# Altium footprint library 排母.PcbLib: 66 footprints (part 4 of 5)
Each footprint in its own frame and in the unit in brackets; x right, y up, seen from the top. Pads: shape width x height; smd on the part's side, far side on the other; paste and mask are expansions set on the pad; w line width, h text height; cw(c..) or ccw(c..) is an arc to the next point about the centre after c.
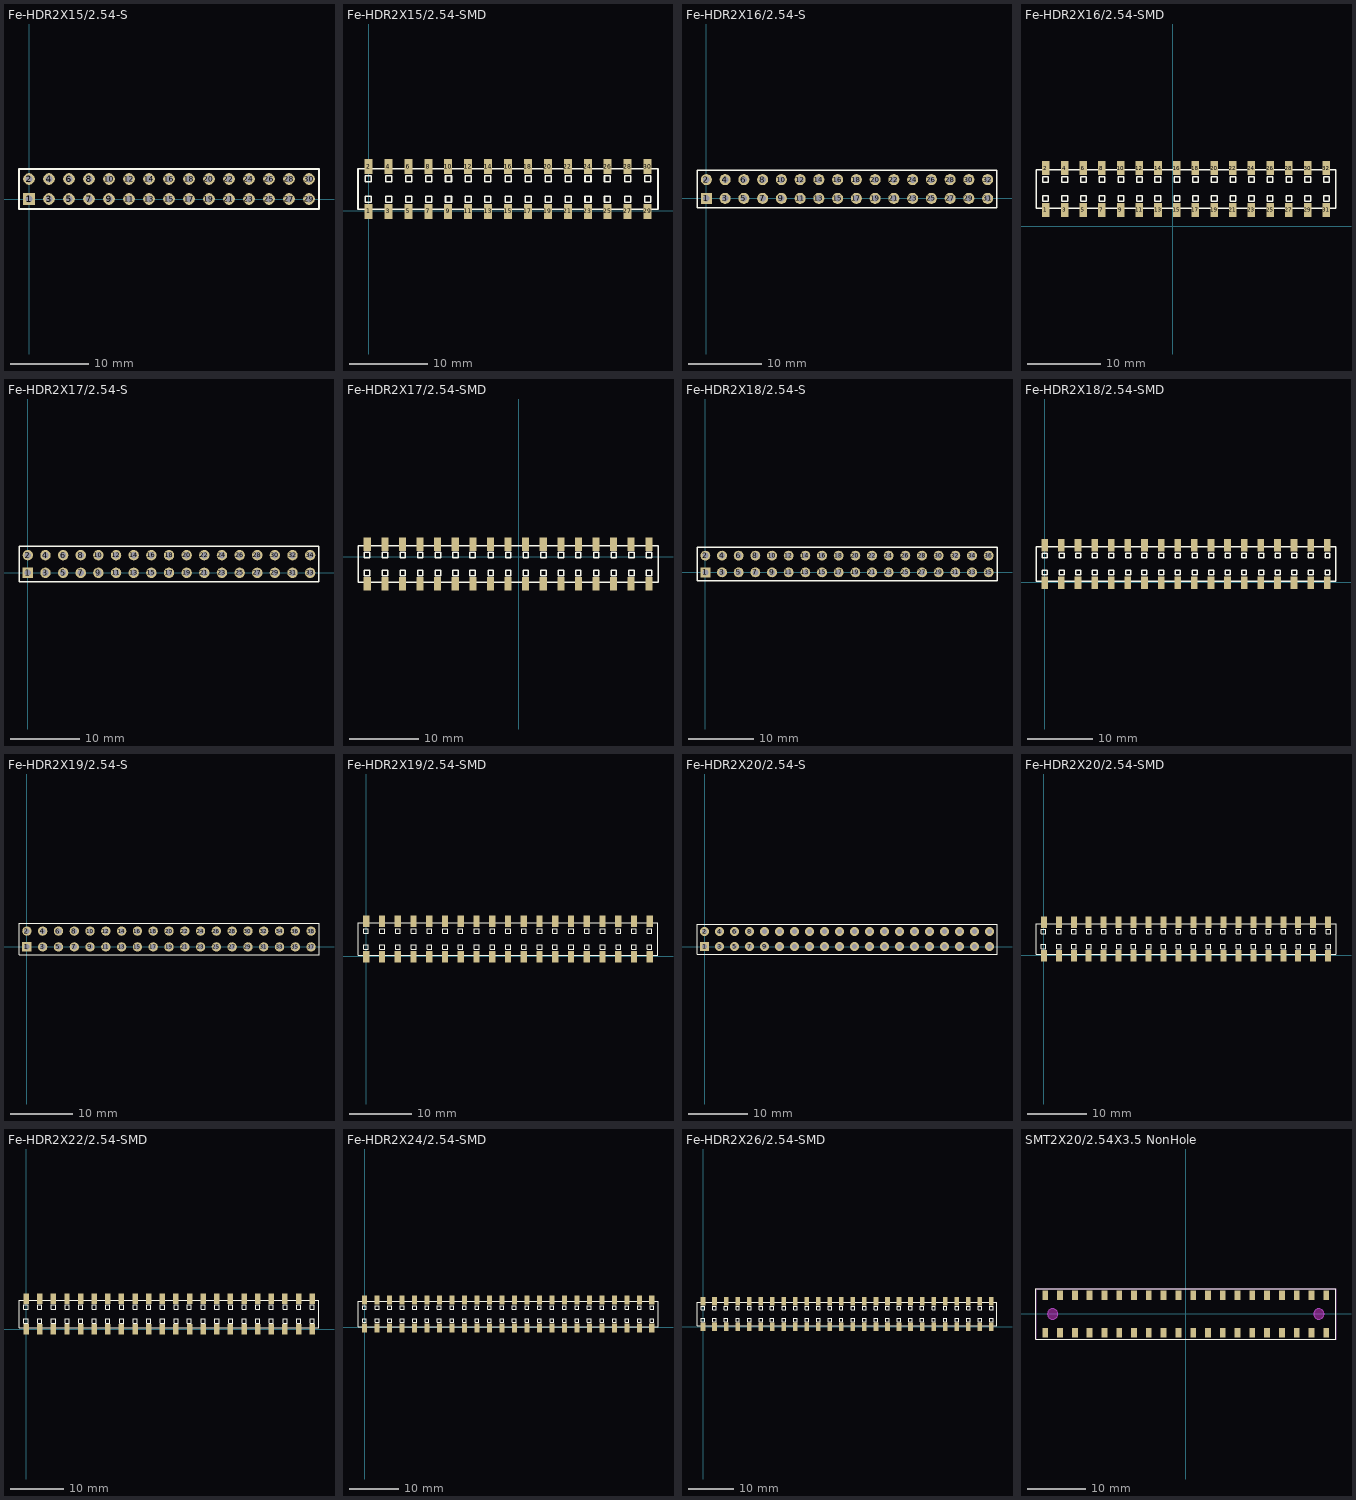
[diagram p3: the footprints below, top view; thin cyan lines are the x and y axes]

## Fe-HDR2X15/2.54-S [mm] "Connector; Header; 15x2 Position"
pads (30):
  rect 1.5x1.5 hole 0.9: 1(0,0)
  round 1.5 hole 0.9: 2(0,2.54) 3(2.54,0) 4(2.54,2.54) 5(5.08,0) 6(5.08,2.54) 7(7.62,0) 8(7.62,2.54) 9(10.16,0) 10(10.16,2.54) 11(12.7,0) 12(12.7,2.54) 13(15.24,0) 14(15.24,2.54) 15(17.78,0) 16(17.78,2.54) 17(20.32,0) 18(20.32,2.54) 19(22.86,0) 20(22.86,2.54) 21(25.4,0) 22(25.4,2.54) 23(27.94,0) 24(27.94,2.54) 25(30.48,0) 26(30.48,2.54) 27(33.02,0) 28(33.02,2.54) 29(35.56,0) 30(35.56,2.54)
Top Overlay:
  lines w0.2: -1.27,-1.27 -1.27,3.81 36.83,3.81 36.83,-1.27 -1.27,-1.27
3D body "Female-Header-2.54-Double-30.stp": height 8.5, standoff -3.2, extent -1.397,-1.27 36.953,3.73

## Fe-HDR2X15/2.54-SMD [mm]
pads (30):
  rect 1.02x1.9 smd: 1(0,-0.056) 2(0,5.644) 3(2.54,-0.056) 4(2.54,5.644) 5(5.08,-0.056) 6(5.08,5.644) 7(7.62,-0.056) 8(7.62,5.644) 9(10.16,-0.056) 10(10.16,5.644) 11(12.7,-0.056) 12(12.7,5.644) 13(15.24,-0.056) 14(15.24,5.644) 15(17.78,-0.056) 16(17.78,5.644) 17(20.32,-0.056) 18(20.32,5.644) 19(22.86,-0.056) 20(22.86,5.644) 21(25.4,-0.056) 22(25.4,5.644) 23(27.94,-0.056) 24(27.94,5.644) 25(30.48,-0.056) 26(30.48,5.644) 27(33.02,-0.056) 28(33.02,5.644) 29(35.56,-0.056) 30(35.56,5.644)
Top Overlay:
  lines w0.2: -1.34,0.194 36.89,0.194 36.89,5.394 -1.34,5.394 -1.34,0.194 ; -0.411,1.113 -0.411,1.875 0.351,1.875 0.351,1.113 -0.411,1.113 ; -0.411,3.713 -0.411,4.475 0.351,4.475 0.351,3.713 -0.411,3.713 ; 2.189,1.113 2.189,1.875 2.951,1.875 2.951,1.113 2.189,1.113 ; 2.189,3.713 2.189,4.475 2.951,4.475 2.951,3.713 2.189,3.713 ; 4.729,1.113 5.491,1.113 5.491,1.875 4.729,1.875 4.729,1.113 ; 4.729,3.713 5.491,3.713 5.491,4.475 4.729,4.475 4.729,3.713 ; 7.269,1.113 7.269,1.875 8.031,1.875 8.031,1.113 7.269,1.113 ; 7.269,3.713 7.269,4.475 8.031,4.475 8.031,3.713 7.269,3.713 ; 9.809,1.113 9.809,1.875 10.571,1.875 10.571,1.113 9.809,1.113 ; 9.809,3.713 9.809,4.475 10.571,4.475 10.571,3.713 9.809,3.713 ; 12.349,1.113 12.349,1.875 13.111,1.875 13.111,1.113 12.349,1.113 ; 12.349,3.713 12.349,4.475 13.111,4.475 13.111,3.713 12.349,3.713 ; 14.829,1.113 15.591,1.113 15.591,1.875 14.829,1.875 14.829,1.113 ; 14.829,3.713 15.591,3.713 15.591,4.475 14.829,4.475 14.829,3.713 ; 17.429,1.113 18.191,1.113 18.191,1.875 17.429,1.875 17.429,1.113 ; 17.429,3.713 18.191,3.713 18.191,4.475 17.429,4.475 17.429,3.713 ; 19.969,1.113 19.969,1.875 20.731,1.875 20.731,1.113 19.969,1.113 ; 19.969,3.713 19.969,4.475 20.731,4.475 20.731,3.713 19.969,3.713 ; 22.509,1.113 23.271,1.113 23.271,1.875 22.509,1.875 22.509,1.113 ; 22.509,3.713 23.271,3.713 23.271,4.475 22.509,4.475 22.509,3.713 ; 25.049,1.113 25.811,1.113 25.811,1.875 25.049,1.875 25.049,1.113 ; 25.049,3.713 25.811,3.713 25.811,4.475 25.049,4.475 25.049,3.713 ; 27.589,1.113 28.351,1.113 28.351,1.875 27.589,1.875 27.589,1.113 ; 27.589,3.713 28.351,3.713 28.351,4.475 27.589,4.475 27.589,3.713 ; 30.069,1.113 30.831,1.113 30.831,1.875 30.069,1.875 30.069,1.113 ; 30.069,3.713 30.831,3.713 30.831,4.475 30.069,4.475 30.069,3.713 ; 32.669,1.113 33.431,1.113 33.431,1.875 32.669,1.875 32.669,1.113 ; 32.669,3.713 33.431,3.713 33.431,4.475 32.669,4.475 32.669,3.713 ; 35.209,1.113 35.209,1.875 35.971,1.875 35.971,1.113 35.209,1.113 ; 35.209,3.713 35.209,4.475 35.971,4.475 35.971,3.713 35.209,3.713
3D body "Fe-Header2X1.STEP": height 5.15, standoff 0, extent 34.23,-0.558 36.83,5.842
3D body "Fe-Header2X1.STEP": height 5.15, standoff 0, extent 13.91,-0.558 16.51,5.842
3D body "Fe-Header2X1.STEP": height 5.15, standoff 0, extent 11.37,-0.558 13.97,5.842
3D body "Fe-Header2X1.STEP": height 5.15, standoff 0, extent 6.29,-0.558 8.89,5.842
3D body "Fe-Header2X1.STEP": height 5.15, standoff 0, extent 8.83,-0.558 11.43,5.842
3D body "Fe-Header2X1.STEP": height 5.15, standoff 0, extent -1.33,-0.558 1.27,5.842
3D body "Fe-Header2X1.STEP": height 5.15, standoff 0, extent 1.21,-0.558 3.81,5.842
3D body "Fe-Header2X1.STEP": height 5.15, standoff 0, extent 3.75,-0.558 6.35,5.842
3D body "Fe-Header2X1.STEP": height 5.15, standoff 0, extent 21.53,-0.558 24.13,5.842
3D body "Fe-Header2X1.STEP": height 5.15, standoff 0, extent 18.99,-0.558 21.59,5.842
3D body "Fe-Header2X1.STEP": height 5.15, standoff 0, extent 16.45,-0.558 19.05,5.842
3D body "Fe-Header2X1.STEP": height 5.15, standoff 0, extent 26.61,-0.558 29.21,5.842
3D body "Fe-Header2X1.STEP": height 5.15, standoff 0, extent 24.07,-0.558 26.67,5.842
3D body "Fe-Header2X1.STEP": height 5.15, standoff 0, extent 29.15,-0.558 31.75,5.842
3D body "Fe-Header2X1.STEP": height 5.15, standoff 0, extent 31.69,-0.558 34.29,5.842

## Fe-HDR2X16/2.54-S [mm] "Connector; Header; 16x2 Position"
pads (32):
  rect 1.5x1.5 hole 0.9: 1(0,0)
  round 1.5 hole 0.9: 2(0,2.54) 3(2.54,0) 4(2.54,2.54) 5(5.08,0) 6(5.08,2.54) 7(7.62,0) 8(7.62,2.54) 9(10.16,0) 10(10.16,2.54) 11(12.7,0) 12(12.7,2.54) 13(15.24,0) 14(15.24,2.54) 15(17.78,0) 16(17.78,2.54) 17(20.32,0) 18(20.32,2.54) 19(22.86,0) 20(22.86,2.54) 21(25.4,0) 22(25.4,2.54) 23(27.94,0) 24(27.94,2.54) 25(30.48,0) 26(30.48,2.54) 27(33.02,0) 28(33.02,2.54) 29(35.56,0) 30(35.56,2.54) 31(38.1,0) 32(38.1,2.54)
Top Overlay:
  lines w0.2: -1.27,-1.27 39.37,-1.27 39.37,3.81 -1.27,3.81 -1.27,-1.27
3D body "Female-Header-2.54-Double-32.stp": height 8.5, standoff -3.2, extent -1.397,-1.19 39.493,3.81

## Fe-HDR2X16/2.54-SMD [mm]
pads (32):
  rect 1.02x1.9 smd: 1(-17.272,2.23) 2(-17.272,7.93) 3(-14.732,2.23) 4(-14.732,7.93) 5(-12.192,2.23) 6(-12.192,7.93) 7(-9.652,2.23) 8(-9.652,7.93) 9(-7.112,2.23) 10(-7.112,7.93) 11(-4.572,2.23) 12(-4.572,7.93) 13(-2.032,2.23) 14(-2.032,7.93) 15(0.508,2.23) 16(0.508,7.93) 17(3.048,2.23) 18(3.048,7.93) 19(5.588,2.23) 20(5.588,7.93) 21(8.128,2.23) 22(8.128,7.93) 23(10.668,2.23) 24(10.668,7.93) 25(13.208,2.23) 26(13.208,7.93) 27(15.748,2.23) 28(15.748,7.93) 29(18.288,2.23) 30(18.288,7.93) 31(20.828,2.23) 32(20.828,7.93)
Top Overlay:
  lines w0.2: -18.612,2.48 -18.612,7.68 22.158,7.68 22.158,2.48 -18.612,2.48 ; -17.683,3.399 -16.921,3.399 -16.921,4.161 -17.683,4.161 -17.683,3.399 ; -17.683,5.999 -16.921,5.999 -16.921,6.761 -17.683,6.761 -17.683,5.999 ; -15.083,3.399 -14.321,3.399 -14.321,4.161 -15.083,4.161 -15.083,3.399 ; -15.083,5.999 -14.321,5.999 -14.321,6.761 -15.083,6.761 -15.083,5.999 ; -12.543,3.399 -12.543,4.161 -11.781,4.161 -11.781,3.399 -12.543,3.399 ; -12.543,5.999 -12.543,6.761 -11.781,6.761 -11.781,5.999 -12.543,5.999 ; -10.003,3.399 -9.241,3.399 -9.241,4.161 -10.003,4.161 -10.003,3.399 ; -10.003,5.999 -9.241,5.999 -9.241,6.761 -10.003,6.761 -10.003,5.999 ; -7.463,3.399 -6.701,3.399 -6.701,4.161 -7.463,4.161 -7.463,3.399 ; -7.463,5.999 -6.701,5.999 -6.701,6.761 -7.463,6.761 -7.463,5.999 ; -4.923,3.399 -4.161,3.399 -4.161,4.161 -4.923,4.161 -4.923,3.399 ; -4.923,5.999 -4.161,5.999 -4.161,6.761 -4.923,6.761 -4.923,5.999 ; -2.443,3.399 -2.443,4.161 -1.681,4.161 -1.681,3.399 -2.443,3.399 ; -2.443,5.999 -2.443,6.761 -1.681,6.761 -1.681,5.999 -2.443,5.999 ; 0.157,3.399 0.157,4.161 0.919,4.161 0.919,3.399 0.157,3.399 ; 0.157,5.999 0.157,6.761 0.919,6.761 0.919,5.999 0.157,5.999 ; 2.697,3.399 3.459,3.399 3.459,4.161 2.697,4.161 2.697,3.399 ; 2.697,5.999 3.459,5.999 3.459,6.761 2.697,6.761 2.697,5.999 ; 5.237,3.399 5.237,4.161 5.999,4.161 5.999,3.399 5.237,3.399 ; 5.237,5.999 5.237,6.761 5.999,6.761 5.999,5.999 5.237,5.999 ; 7.777,3.399 7.777,4.161 8.539,4.161 8.539,3.399 7.777,3.399 ; 7.777,5.999 7.777,6.761 8.539,6.761 8.539,5.999 7.777,5.999 ; 10.317,3.399 10.317,4.161 11.079,4.161 11.079,3.399 10.317,3.399 ; 10.317,5.999 10.317,6.761 11.079,6.761 11.079,5.999 10.317,5.999 ; 12.797,3.399 12.797,4.161 13.559,4.161 13.559,3.399 12.797,3.399 ; 12.797,5.999 12.797,6.761 13.559,6.761 13.559,5.999 12.797,5.999 ; 15.397,3.399 15.397,4.161 16.159,4.161 16.159,3.399 15.397,3.399 ; 15.397,5.999 15.397,6.761 16.159,6.761 16.159,5.999 15.397,5.999 ; 17.937,3.399 18.699,3.399 18.699,4.161 17.937,4.161 17.937,3.399 ; 17.937,5.999 18.699,5.999 18.699,6.761 17.937,6.761 17.937,5.999 ; 20.477,3.399 20.477,4.161 21.239,4.161 21.239,3.399 20.477,3.399 ; 20.477,5.999 20.477,6.761 21.239,6.761 21.239,5.999 20.477,5.999
3D body "Fe-Header2X1.STEP": height 5.15, standoff 0, extent -5.842,1.778 -3.242,8.178
3D body "Fe-Header2X1.STEP": height 5.15, standoff 0, extent -10.922,1.778 -8.322,8.178
3D body "Fe-Header2X1.STEP": height 5.15, standoff 0, extent -8.382,1.778 -5.782,8.178
3D body "Fe-Header2X1.STEP": height 5.15, standoff 0, extent -18.542,1.778 -15.942,8.178
3D body "Fe-Header2X1.STEP": height 5.15, standoff 0, extent -16.002,1.778 -13.402,8.178
3D body "Fe-Header2X1.STEP": height 5.15, standoff 0, extent -13.462,1.778 -10.862,8.178
3D body "Fe-Header2X1.STEP": height 5.15, standoff 0, extent 9.398,1.778 11.998,8.178
3D body "Fe-Header2X1.STEP": height 5.15, standoff 0, extent 4.318,1.778 6.918,8.178
3D body "Fe-Header2X1.STEP": height 5.15, standoff 0, extent 6.858,1.778 9.458,8.178
3D body "Fe-Header2X1.STEP": height 5.15, standoff 0, extent -3.302,1.778 -0.702,8.178
3D body "Fe-Header2X1.STEP": height 5.15, standoff 0, extent -0.762,1.778 1.838,8.178
3D body "Fe-Header2X1.STEP": height 5.15, standoff 0, extent 1.778,1.778 4.378,8.178
3D body "Fe-Header2X1.STEP": height 5.15, standoff 0, extent 19.558,1.778 22.158,8.178
3D body "Fe-Header2X1.STEP": height 5.15, standoff 0, extent 11.938,1.778 14.538,8.178
3D body "Fe-Header2X1.STEP": height 5.15, standoff 0, extent 14.478,1.778 17.078,8.178
3D body "Fe-Header2X1.STEP": height 5.15, standoff 0, extent 17.018,1.778 19.618,8.178

## Fe-HDR2X17/2.54-S [mm] "Connector; Header; 17x2 Position"
pads (34):
  rect 1.5x1.5 hole 0.9: 1(0,0)
  round 1.5 hole 0.9: 2(0,2.54) 3(2.54,0) 4(2.54,2.54) 5(5.08,0) 6(5.08,2.54) 7(7.62,0) 8(7.62,2.54) 9(10.16,0) 10(10.16,2.54) 11(12.7,0) 12(12.7,2.54) 13(15.24,0) 14(15.24,2.54) 15(17.78,0) 16(17.78,2.54) 17(20.32,0) 18(20.32,2.54) 19(22.86,0) 20(22.86,2.54) 21(25.4,0) 22(25.4,2.54) 23(27.94,0) 24(27.94,2.54) 25(30.48,0) 26(30.48,2.54) 27(33.02,0) 28(33.02,2.54) 29(35.56,0) 30(35.56,2.54) 31(38.1,0) 32(38.1,2.54) 33(40.64,0) 34(40.64,2.54)
Top Overlay:
  lines w0.2: -1.27,-1.27 -1.27,3.81 41.91,3.81 41.91,-1.27 -1.27,-1.27
3D body "Female-Header-2.54-Double-34.stp": height 8.5, standoff -3.2, extent -1.397,-1.23 42.033,3.77

## Fe-HDR2X17/2.54-SMD [mm]
pads (34):
  rect 1.02x1.9 smd: 1(-21.844,-3.866) 2(-21.844,1.834) 3(-19.304,-3.866) 4(-19.304,1.834) 5(-16.764,-3.866) 6(-16.764,1.834) 7(-14.224,-3.866) 8(-14.224,1.834) 9(-11.684,-3.866) 10(-11.684,1.834) 11(-9.144,-3.866) 12(-9.144,1.834) 13(-6.604,-3.866) 14(-6.604,1.834) 15(-4.064,-3.866) 16(-4.064,1.834) 17(-1.524,-3.866) 18(-1.524,1.834) 19(1.016,-3.866) 20(1.016,1.834) 21(3.556,-3.866) 22(3.556,1.834) 23(6.096,-3.866) 24(6.096,1.834) 25(8.636,-3.866) 26(8.636,1.834) 27(11.176,-3.866) 28(11.176,1.834) 29(13.716,-3.866) 30(13.716,1.834) 31(16.256,-3.866) 32(16.256,1.834) 33(18.796,-3.866) 34(18.796,1.834)
Top Overlay:
  lines w0.2: -23.184,-3.616 20.126,-3.616 20.126,1.584 -23.184,1.584 -23.184,-3.616 ; -22.255,-2.697 -21.493,-2.697 -21.493,-1.935 -22.255,-1.935 -22.255,-2.697 ; -22.255,-0.097 -21.493,-0.097 -21.493,0.665 -22.255,0.665 -22.255,-0.097 ; -19.655,-2.697 -18.893,-2.697 -18.893,-1.935 -19.655,-1.935 -19.655,-2.697 ; -19.655,-0.097 -18.893,-0.097 -18.893,0.665 -19.655,0.665 -19.655,-0.097 ; -17.115,-2.697 -17.115,-1.935 -16.353,-1.935 -16.353,-2.697 -17.115,-2.697 ; -17.115,-0.097 -17.115,0.665 -16.353,0.665 -16.353,-0.097 -17.115,-0.097 ; -14.575,-2.697 -13.813,-2.697 -13.813,-1.935 -14.575,-1.935 -14.575,-2.697 ; -14.575,-0.097 -13.813,-0.097 -13.813,0.665 -14.575,0.665 -14.575,-0.097 ; -12.035,-2.697 -11.273,-2.697 -11.273,-1.935 -12.035,-1.935 -12.035,-2.697 ; -12.035,-0.097 -11.273,-0.097 -11.273,0.665 -12.035,0.665 -12.035,-0.097 ; -9.495,-2.697 -8.733,-2.697 -8.733,-1.935 -9.495,-1.935 -9.495,-2.697 ; -9.495,-0.097 -8.733,-0.097 -8.733,0.665 -9.495,0.665 -9.495,-0.097 ; -7.015,-2.697 -7.015,-1.935 -6.253,-1.935 -6.253,-2.697 -7.015,-2.697 ; -7.015,-0.097 -7.015,0.665 -6.253,0.665 -6.253,-0.097 -7.015,-0.097 ; -4.415,-2.697 -4.415,-1.935 -3.653,-1.935 -3.653,-2.697 -4.415,-2.697 ; -4.415,-0.097 -4.415,0.665 -3.653,0.665 -3.653,-0.097 -4.415,-0.097 ; -1.875,-2.697 -1.113,-2.697 -1.113,-1.935 -1.875,-1.935 -1.875,-2.697 ; -1.875,-0.097 -1.113,-0.097 -1.113,0.665 -1.875,0.665 -1.875,-0.097 ; 0.665,-2.697 0.665,-1.935 1.427,-1.935 1.427,-2.697 0.665,-2.697 ; 0.665,-0.097 0.665,0.665 1.427,0.665 1.427,-0.097 0.665,-0.097 ; 3.205,-2.697 3.205,-1.935 3.967,-1.935 3.967,-2.697 3.205,-2.697 ; 3.205,-0.097 3.205,0.665 3.967,0.665 3.967,-0.097 3.205,-0.097 ; 5.745,-2.697 5.745,-1.935 6.507,-1.935 6.507,-2.697 5.745,-2.697 ; 5.745,-0.097 5.745,0.665 6.507,0.665 6.507,-0.097 5.745,-0.097 ; 8.225,-2.697 8.225,-1.935 8.987,-1.935 8.987,-2.697 8.225,-2.697 ; 8.225,-0.097 8.225,0.665 8.987,0.665 8.987,-0.097 8.225,-0.097 ; 10.825,-2.697 10.825,-1.935 11.587,-1.935 11.587,-2.697 10.825,-2.697 ; 10.825,-0.097 10.825,0.665 11.587,0.665 11.587,-0.097 10.825,-0.097 ; 13.365,-2.697 14.127,-2.697 14.127,-1.935 13.365,-1.935 13.365,-2.697 ; 13.365,-0.097 14.127,-0.097 14.127,0.665 13.365,0.665 13.365,-0.097 ; 15.905,-2.697 15.905,-1.935 16.667,-1.935 16.667,-2.697 15.905,-2.697 ; 15.905,-0.097 15.905,0.665 16.667,0.665 16.667,-0.097 15.905,-0.097 ; 18.445,-2.697 18.445,-1.935 19.207,-1.935 19.207,-2.697 18.445,-2.697 ; 18.445,-0.097 18.445,0.665 19.207,0.665 19.207,-0.097 18.445,-0.097
3D body "Fe-Header2X1.STEP": height 5.15, standoff 0, extent -10.414,-4.064 -7.814,2.336
3D body "Fe-Header2X1.STEP": height 5.15, standoff 0, extent -15.494,-4.064 -12.894,2.336
3D body "Fe-Header2X1.STEP": height 5.15, standoff 0, extent -12.954,-4.064 -10.354,2.336
3D body "Fe-Header2X1.STEP": height 5.15, standoff 0, extent -23.114,-4.064 -20.514,2.336
3D body "Fe-Header2X1.STEP": height 5.15, standoff 0, extent -20.574,-4.064 -17.974,2.336
3D body "Fe-Header2X1.STEP": height 5.15, standoff 0, extent -18.034,-4.064 -15.434,2.336
3D body "Fe-Header2X1.STEP": height 5.15, standoff 0, extent 4.826,-4.064 7.426,2.336
3D body "Fe-Header2X1.STEP": height 5.15, standoff 0, extent -0.254,-4.064 2.346,2.336
3D body "Fe-Header2X1.STEP": height 5.15, standoff 0, extent 2.286,-4.064 4.886,2.336
3D body "Fe-Header2X1.STEP": height 5.15, standoff 0, extent -7.874,-4.064 -5.274,2.336
3D body "Fe-Header2X1.STEP": height 5.15, standoff 0, extent -5.334,-4.064 -2.734,2.336
3D body "Fe-Header2X1.STEP": height 5.15, standoff 0, extent -2.794,-4.064 -0.194,2.336
3D body "Fe-Header2X1.STEP": height 5.15, standoff 0, extent 14.986,-4.064 17.586,2.336
3D body "Fe-Header2X1.STEP": height 5.15, standoff 0, extent 17.526,-4.064 20.126,2.336
3D body "Fe-Header2X1.STEP": height 5.15, standoff 0, extent 7.366,-4.064 9.966,2.336
3D body "Fe-Header2X1.STEP": height 5.15, standoff 0, extent 9.906,-4.064 12.506,2.336
3D body "Fe-Header2X1.STEP": height 5.15, standoff 0, extent 12.446,-4.064 15.046,2.336

## Fe-HDR2X18/2.54-S [mm] "Connector; Header; 18x2 Position"
pads (36):
  rect 1.5x1.5 hole 0.9: 1(0,0)
  round 1.5 hole 0.9: 2(0,2.54) 3(2.54,0) 4(2.54,2.54) 5(5.08,0) 6(5.08,2.54) 7(7.62,0) 8(7.62,2.54) 9(10.16,0) 10(10.16,2.54) 11(12.7,0) 12(12.7,2.54) 13(15.24,0) 14(15.24,2.54) 15(17.78,0) 16(17.78,2.54) 17(20.32,0) 18(20.32,2.54) 19(22.86,0) 20(22.86,2.54) 21(25.4,0) 22(25.4,2.54) 23(27.94,0) 24(27.94,2.54) 25(30.48,0) 26(30.48,2.54) 27(33.02,0) 28(33.02,2.54) 29(35.56,0) 30(35.56,2.54) 31(38.1,0) 32(38.1,2.54) 33(40.64,0) 34(40.64,2.54) 35(43.18,0) 36(43.18,2.54)
Top Overlay:
  lines w0.2: -1.27,-1.27 44.45,-1.27 44.45,3.81 -1.27,3.81 -1.27,-1.27
3D body "Female-Header-2.54-Double-36.stp": height 8.5, standoff -3.2, extent -1.397,-1.23 44.573,3.77

## Fe-HDR2X18/2.54-SMD [mm]
pads (36):
  rect 1.02x1.9 smd: 1(0,-0.056) 2(0,5.644) 3(2.54,-0.056) 4(2.54,5.644) 5(5.08,-0.056) 6(5.08,5.644) 7(7.62,-0.056) 8(7.62,5.644) 9(10.16,-0.056) 10(10.16,5.644) 11(12.7,-0.056) 12(12.7,5.644) 13(15.24,-0.056) 14(15.24,5.644) 15(17.78,-0.056) 16(17.78,5.644) 17(20.32,-0.056) 18(20.32,5.644) 19(22.86,-0.056) 20(22.86,5.644) 21(25.4,-0.056) 22(25.4,5.644) 23(27.94,-0.056) 24(27.94,5.644) 25(30.48,-0.056) 26(30.48,5.644) 27(33.02,-0.056) 28(33.02,5.644) 29(35.56,-0.056) 30(35.56,5.644) 31(38.1,-0.056) 32(38.1,5.644) 33(40.64,-0.056) 34(40.64,5.644) 35(43.18,-0.056) 36(43.18,5.644)
Top Overlay:
  lines w0.2: -1.34,0.194 44.51,0.194 44.51,5.394 -1.34,5.394 -1.34,0.194 ; -0.411,1.113 -0.411,1.875 0.351,1.875 0.351,1.113 -0.411,1.113 ; -0.411,3.713 -0.411,4.475 0.351,4.475 0.351,3.713 -0.411,3.713 ; 2.189,1.113 2.189,1.875 2.951,1.875 2.951,1.113 2.189,1.113 ; 2.189,3.713 2.189,4.475 2.951,4.475 2.951,3.713 2.189,3.713 ; 4.729,1.113 5.491,1.113 5.491,1.875 4.729,1.875 4.729,1.113 ; 4.729,3.713 5.491,3.713 5.491,4.475 4.729,4.475 4.729,3.713 ; 7.269,1.113 7.269,1.875 8.031,1.875 8.031,1.113 7.269,1.113 ; 7.269,3.713 7.269,4.475 8.031,4.475 8.031,3.713 7.269,3.713 ; 9.809,1.113 9.809,1.875 10.571,1.875 10.571,1.113 9.809,1.113 ; 9.809,3.713 9.809,4.475 10.571,4.475 10.571,3.713 9.809,3.713 ; 12.349,1.113 12.349,1.875 13.111,1.875 13.111,1.113 12.349,1.113 ; 12.349,3.713 12.349,4.475 13.111,4.475 13.111,3.713 12.349,3.713 ; 14.829,1.113 15.591,1.113 15.591,1.875 14.829,1.875 14.829,1.113 ; 14.829,3.713 15.591,3.713 15.591,4.475 14.829,4.475 14.829,3.713 ; 17.429,1.113 18.191,1.113 18.191,1.875 17.429,1.875 17.429,1.113 ; 17.429,3.713 18.191,3.713 18.191,4.475 17.429,4.475 17.429,3.713 ; 19.969,1.113 19.969,1.875 20.731,1.875 20.731,1.113 19.969,1.113 ; 19.969,3.713 19.969,4.475 20.731,4.475 20.731,3.713 19.969,3.713 ; 22.509,1.113 23.271,1.113 23.271,1.875 22.509,1.875 22.509,1.113 ; 22.509,3.713 23.271,3.713 23.271,4.475 22.509,4.475 22.509,3.713 ; 25.049,1.113 25.811,1.113 25.811,1.875 25.049,1.875 25.049,1.113 ; 25.049,3.713 25.811,3.713 25.811,4.475 25.049,4.475 25.049,3.713 ; 27.589,1.113 28.351,1.113 28.351,1.875 27.589,1.875 27.589,1.113 ; 27.589,3.713 28.351,3.713 28.351,4.475 27.589,4.475 27.589,3.713 ; 30.069,1.113 30.831,1.113 30.831,1.875 30.069,1.875 30.069,1.113 ; 30.069,3.713 30.831,3.713 30.831,4.475 30.069,4.475 30.069,3.713 ; 32.669,1.113 33.431,1.113 33.431,1.875 32.669,1.875 32.669,1.113 ; 32.669,3.713 33.431,3.713 33.431,4.475 32.669,4.475 32.669,3.713 ; 35.209,1.113 35.209,1.875 35.971,1.875 35.971,1.113 35.209,1.113 ; 35.209,3.713 35.209,4.475 35.971,4.475 35.971,3.713 35.209,3.713 ; 37.749,1.113 38.511,1.113 38.511,1.875 37.749,1.875 37.749,1.113 ; 37.749,3.713 38.511,3.713 38.511,4.475 37.749,4.475 37.749,3.713 ; 40.289,1.113 41.051,1.113 41.051,1.875 40.289,1.875 40.289,1.113 ; 40.289,3.713 41.051,3.713 41.051,4.475 40.289,4.475 40.289,3.713 ; 42.829,1.113 43.591,1.113 43.591,1.875 42.829,1.875 42.829,1.113 ; 42.829,3.713 43.591,3.713 43.591,4.475 42.829,4.475 42.829,3.713
3D body "Fe-Header2X1.STEP": height 5.15, standoff 0, extent 34.29,-0.254 36.89,6.146
3D body "Fe-Header2X1.STEP": height 5.15, standoff 0, extent 31.75,-0.254 34.35,6.146
3D body "Fe-Header2X1.STEP": height 5.15, standoff 0, extent 29.21,-0.254 31.81,6.146
3D body "Fe-Header2X1.STEP": height 5.15, standoff 0, extent 39.37,-0.254 41.97,6.146
3D body "Fe-Header2X1.STEP": height 5.15, standoff 0, extent 36.83,-0.254 39.43,6.146
3D body "Fe-Header2X1.STEP": height 5.15, standoff 0, extent 41.91,-0.254 44.51,6.146
3D body "Fe-Header2X1.STEP": height 5.15, standoff 0, extent 19.05,-0.254 21.65,6.146
3D body "Fe-Header2X1.STEP": height 5.15, standoff 0, extent 16.51,-0.254 19.11,6.146
3D body "Fe-Header2X1.STEP": height 5.15, standoff 0, extent 13.97,-0.254 16.57,6.146
3D body "Fe-Header2X1.STEP": height 5.15, standoff 0, extent 24.13,-0.254 26.73,6.146
3D body "Fe-Header2X1.STEP": height 5.15, standoff 0, extent 21.59,-0.254 24.19,6.146
3D body "Fe-Header2X1.STEP": height 5.15, standoff 0, extent 26.67,-0.254 29.27,6.146
3D body "Fe-Header2X1.STEP": height 5.15, standoff 0, extent 3.81,-0.254 6.41,6.146
3D body "Fe-Header2X1.STEP": height 5.15, standoff 0, extent 1.27,-0.254 3.87,6.146
3D body "Fe-Header2X1.STEP": height 5.15, standoff 0, extent -1.27,-0.254 1.33,6.146
3D body "Fe-Header2X1.STEP": height 5.15, standoff 0, extent 8.89,-0.254 11.49,6.146
3D body "Fe-Header2X1.STEP": height 5.15, standoff 0, extent 6.35,-0.254 8.95,6.146
3D body "Fe-Header2X1.STEP": height 5.15, standoff 0, extent 11.43,-0.254 14.03,6.146

## Fe-HDR2X19/2.54-S [mm] "Connector; Header; 19x2 Position"
pads (38):
  rect 1.5x1.5 hole 0.9: 1(0,0)
  round 1.5 hole 0.9: 2(0,2.54) 3(2.54,0) 4(2.54,2.54) 5(5.08,0) 6(5.08,2.54) 7(7.62,0) 8(7.62,2.54) 9(10.16,0) 10(10.16,2.54) 11(12.7,0) 12(12.7,2.54) 13(15.24,0) 14(15.24,2.54) 15(17.78,0) 16(17.78,2.54) 17(20.32,0) 18(20.32,2.54) 19(22.86,0) 20(22.86,2.54) 21(25.4,0) 22(25.4,2.54) 23(27.94,0) 24(27.94,2.54) 25(30.48,0) 26(30.48,2.54) 27(33.02,0) 28(33.02,2.54) 29(35.56,0) 30(35.56,2.54) 31(38.1,0) 32(38.1,2.54) 33(40.64,0) 34(40.64,2.54) 35(43.18,0) 36(43.18,2.54) 37(45.72,0) 38(45.72,2.54)
Top Overlay:
  lines w0.2: -1.27,-1.27 -1.27,3.81 46.99,3.81 46.99,-1.27 -1.27,-1.27
3D body "Female-Header-2.54-Double-38.stp": height 8.5, standoff -3.2, extent -1.397,-1.23 47.113,3.77

## Fe-HDR2X19/2.54-SMD [mm]
pads (38):
  rect 1.02x1.9 smd: 1(0,-0.056) 2(0,5.644) 3(2.54,-0.056) 4(2.54,5.644) 5(5.08,-0.056) 6(5.08,5.644) 7(7.62,-0.056) 8(7.62,5.644) 9(10.16,-0.056) 10(10.16,5.644) 11(12.7,-0.056) 12(12.7,5.644) 13(15.24,-0.056) 14(15.24,5.644) 15(17.78,-0.056) 16(17.78,5.644) 17(20.32,-0.056) 18(20.32,5.644) 19(22.86,-0.056) 20(22.86,5.644) 21(25.4,-0.056) 22(25.4,5.644) 23(27.94,-0.056) 24(27.94,5.644) 25(30.48,-0.056) 26(30.48,5.644) 27(33.02,-0.056) 28(33.02,5.644) 29(35.56,-0.056) 30(35.56,5.644) 31(38.1,-0.056) 32(38.1,5.644) 33(40.64,-0.056) 34(40.64,5.644) 35(43.18,-0.056) 36(43.18,5.644) 37(45.72,-0.056) 38(45.72,5.644)
Top Overlay:
  drawing of 156 lines, arcs and shapes, not listed
3D body "Fe-Header2X1.STEP": height 5.15, standoff 0, extent 44.45,-0.508 47.05,5.892
3D body "Fe-Header2X1.STEP": height 5.15, standoff 0, extent 34.29,-0.508 36.89,5.892
3D body "Fe-Header2X1.STEP": height 5.15, standoff 0, extent 31.75,-0.508 34.35,5.892
3D body "Fe-Header2X1.STEP": height 5.15, standoff 0, extent 29.21,-0.508 31.81,5.892
3D body "Fe-Header2X1.STEP": height 5.15, standoff 0, extent 39.37,-0.508 41.97,5.892
3D body "Fe-Header2X1.STEP": height 5.15, standoff 0, extent 36.83,-0.508 39.43,5.892
3D body "Fe-Header2X1.STEP": height 5.15, standoff 0, extent 41.91,-0.508 44.51,5.892
3D body "Fe-Header2X1.STEP": height 5.15, standoff 0, extent 19.05,-0.508 21.65,5.892
3D body "Fe-Header2X1.STEP": height 5.15, standoff 0, extent 16.51,-0.508 19.11,5.892
3D body "Fe-Header2X1.STEP": height 5.15, standoff 0, extent 13.97,-0.508 16.57,5.892
3D body "Fe-Header2X1.STEP": height 5.15, standoff 0, extent 24.13,-0.508 26.73,5.892
3D body "Fe-Header2X1.STEP": height 5.15, standoff 0, extent 21.59,-0.508 24.19,5.892
3D body "Fe-Header2X1.STEP": height 5.15, standoff 0, extent 26.67,-0.508 29.27,5.892
3D body "Fe-Header2X1.STEP": height 5.15, standoff 0, extent 3.81,-0.508 6.41,5.892
3D body "Fe-Header2X1.STEP": height 5.15, standoff 0, extent 1.27,-0.508 3.87,5.892
3D body "Fe-Header2X1.STEP": height 5.15, standoff 0, extent -1.27,-0.508 1.33,5.892
3D body "Fe-Header2X1.STEP": height 5.15, standoff 0, extent 8.89,-0.508 11.49,5.892
3D body "Fe-Header2X1.STEP": height 5.15, standoff 0, extent 6.35,-0.508 8.95,5.892
3D body "Fe-Header2X1.STEP": height 5.15, standoff 0, extent 11.43,-0.508 14.03,5.892

## Fe-HDR2X20/2.54-S [mm] "Connector; Header; 20x2 Position"
pads (40):
  rect 1.5x1.5 hole 0.9: 1(0,0)
  round 1.5 hole 0.9: 2(0,2.54) 3(2.54,0) 4(2.54,2.54) 5(5.08,0) 6(5.08,2.54) 7(7.62,0) 8(7.62,2.54) 9(10.16,0) 10(10.16,2.54) 11(12.7,0) 12(12.7,2.54) 13(15.24,0) 14(15.24,2.54) 15(17.78,0) 16(17.78,2.54) 17(20.32,0) 18(20.32,2.54) 19(22.86,0) 20(22.86,2.54) 21(25.4,0) 22(25.4,2.54) 23(27.94,0) 24(27.94,2.54) 25(30.48,0) 26(30.48,2.54) 27(33.02,0) 28(33.02,2.54) 29(35.56,0) 30(35.56,2.54) 31(38.1,0) 32(38.1,2.54) 33(40.64,0) 34(40.64,2.54) 35(43.18,0) 36(43.18,2.54) 37(45.72,0) 38(45.72,2.54) 39(48.26,0) 40(48.26,2.54)
Top Overlay:
  lines w0.2: -1.27,-1.27 49.53,-1.27 49.53,3.81 -1.27,3.81 -1.27,-1.27
3D body "Female-Header-2.54-Double-40.stp": height 8.5, standoff -3.2, extent -1.397,-1.23 49.653,3.77

## Fe-HDR2X20/2.54-SMD [mm]
pads (40):
  rect 1.02x1.9 smd: 1(0,-0.056) 2(0,5.644) 3(2.54,-0.056) 4(2.54,5.644) 5(5.08,-0.056) 6(5.08,5.644) 7(7.62,-0.056) 8(7.62,5.644) 9(10.16,-0.056) 10(10.16,5.644) 11(12.7,-0.056) 12(12.7,5.644) 13(15.24,-0.056) 14(15.24,5.644) 15(17.78,-0.056) 16(17.78,5.644) 17(20.32,-0.056) 18(20.32,5.644) 19(22.86,-0.056) 20(22.86,5.644) 21(25.4,-0.056) 22(25.4,5.644) 23(27.94,-0.056) 24(27.94,5.644) 25(30.48,-0.056) 26(30.48,5.644) 27(33.02,-0.056) 28(33.02,5.644) 29(35.56,-0.056) 30(35.56,5.644) 31(38.1,-0.056) 32(38.1,5.644) 33(40.64,-0.056) 34(40.64,5.644) 35(43.18,-0.056) 36(43.18,5.644) 37(45.72,-0.056) 38(45.72,5.644) 39(48.26,-0.056) 40(48.26,5.644)
Top Overlay:
  drawing of 164 lines, arcs and shapes, not listed
3D body "Fe-Header2X1.STEP": height 5.15, standoff 0, extent 11.43,-0.508 14.03,5.892
3D body "Fe-Header2X1.STEP": height 5.15, standoff 0, extent 6.35,-0.508 8.95,5.892
3D body "Fe-Header2X1.STEP": height 5.15, standoff 0, extent 8.89,-0.508 11.49,5.892
3D body "Fe-Header2X1.STEP": height 5.15, standoff 0, extent -1.27,-0.508 1.33,5.892
3D body "Fe-Header2X1.STEP": height 5.15, standoff 0, extent 1.27,-0.508 3.87,5.892
3D body "Fe-Header2X1.STEP": height 5.15, standoff 0, extent 3.81,-0.508 6.41,5.892
3D body "Fe-Header2X1.STEP": height 5.15, standoff 0, extent 26.67,-0.508 29.27,5.892
3D body "Fe-Header2X1.STEP": height 5.15, standoff 0, extent 21.59,-0.508 24.19,5.892
3D body "Fe-Header2X1.STEP": height 5.15, standoff 0, extent 24.13,-0.508 26.73,5.892
3D body "Fe-Header2X1.STEP": height 5.15, standoff 0, extent 13.97,-0.508 16.57,5.892
3D body "Fe-Header2X1.STEP": height 5.15, standoff 0, extent 16.51,-0.508 19.11,5.892
3D body "Fe-Header2X1.STEP": height 5.15, standoff 0, extent 19.05,-0.508 21.65,5.892
3D body "Fe-Header2X1.STEP": height 5.15, standoff 0, extent 41.91,-0.508 44.51,5.892
3D body "Fe-Header2X1.STEP": height 5.15, standoff 0, extent 36.83,-0.508 39.43,5.892
3D body "Fe-Header2X1.STEP": height 5.15, standoff 0, extent 39.37,-0.508 41.97,5.892
3D body "Fe-Header2X1.STEP": height 5.15, standoff 0, extent 29.21,-0.508 31.81,5.892
3D body "Fe-Header2X1.STEP": height 5.15, standoff 0, extent 31.75,-0.508 34.35,5.892
3D body "Fe-Header2X1.STEP": height 5.15, standoff 0, extent 34.29,-0.508 36.89,5.892
3D body "Fe-Header2X1.STEP": height 5.15, standoff 0, extent 44.45,-0.508 47.05,5.892
3D body "Fe-Header2X1.STEP": height 5.15, standoff 0, extent 46.99,-0.508 49.59,5.892

## Fe-HDR2X22/2.54-SMD [mm]
pads (44):
  rect 1.02x1.9 smd: 1(0,0) 2(0,5.7) 3(2.54,0) 4(2.54,5.7) 5(5.08,0) 6(5.08,5.7) 7(7.62,0) 8(7.62,5.7) 9(10.16,0) 10(10.16,5.7) 11(12.7,0) 12(12.7,5.7) 13(15.24,0) 14(15.24,5.7) 15(17.78,0) 16(17.78,5.7) 17(20.32,0) 18(20.32,5.7) 19(22.86,0) 20(22.86,5.7) 21(25.4,0) 22(25.4,5.7) 23(27.94,0) 24(27.94,5.7) 25(30.48,0) 26(30.48,5.7) 27(33.02,0) 28(33.02,5.7) 29(35.56,0) 30(35.56,5.7) 31(38.1,0) 32(38.1,5.7) 33(40.64,0) 34(40.64,5.7) 35(43.18,0) 36(43.18,5.7) 37(45.72,0) 38(45.72,5.7) 39(48.26,0) 40(48.26,5.7) 41(50.8,0) 42(50.8,5.7) 43(53.34,0) 44(53.34,5.7)
Top Overlay:
  drawing of 180 lines, arcs and shapes, not listed
3D body "Fe-Header2X1.STEP": height 5.15, standoff 0, extent 11.43,-0.254 14.03,6.146
3D body "Fe-Header2X1.STEP": height 5.15, standoff 0, extent 6.35,-0.254 8.95,6.146
3D body "Fe-Header2X1.STEP": height 5.15, standoff 0, extent 8.89,-0.254 11.49,6.146
3D body "Fe-Header2X1.STEP": height 5.15, standoff 0, extent -1.27,-0.254 1.33,6.146
3D body "Fe-Header2X1.STEP": height 5.15, standoff 0, extent 1.27,-0.254 3.87,6.146
3D body "Fe-Header2X1.STEP": height 5.15, standoff 0, extent 3.81,-0.254 6.41,6.146
3D body "Fe-Header2X1.STEP": height 5.15, standoff 0, extent 26.67,-0.254 29.27,6.146
3D body "Fe-Header2X1.STEP": height 5.15, standoff 0, extent 21.59,-0.254 24.19,6.146
3D body "Fe-Header2X1.STEP": height 5.15, standoff 0, extent 24.13,-0.254 26.73,6.146
3D body "Fe-Header2X1.STEP": height 5.15, standoff 0, extent 13.97,-0.254 16.57,6.146
3D body "Fe-Header2X1.STEP": height 5.15, standoff 0, extent 16.51,-0.254 19.11,6.146
3D body "Fe-Header2X1.STEP": height 5.15, standoff 0, extent 19.05,-0.254 21.65,6.146
3D body "Fe-Header2X1.STEP": height 5.15, standoff 0, extent 41.91,-0.254 44.51,6.146
3D body "Fe-Header2X1.STEP": height 5.15, standoff 0, extent 36.83,-0.254 39.43,6.146
3D body "Fe-Header2X1.STEP": height 5.15, standoff 0, extent 39.37,-0.254 41.97,6.146
3D body "Fe-Header2X1.STEP": height 5.15, standoff 0, extent 29.21,-0.254 31.81,6.146
3D body "Fe-Header2X1.STEP": height 5.15, standoff 0, extent 31.75,-0.254 34.35,6.146
3D body "Fe-Header2X1.STEP": height 5.15, standoff 0, extent 34.29,-0.254 36.89,6.146
3D body "Fe-Header2X1.STEP": height 5.15, standoff 0, extent 52.07,-0.254 54.67,6.146
3D body "Fe-Header2X1.STEP": height 5.15, standoff 0, extent 44.45,-0.254 47.05,6.146
3D body "Fe-Header2X1.STEP": height 5.15, standoff 0, extent 46.99,-0.254 49.59,6.146
3D body "Fe-Header2X1.STEP": height 5.15, standoff 0, extent 49.53,-0.254 52.13,6.146

## Fe-HDR2X24/2.54-SMD [mm]
pads (48):
  rect 1.02x1.9 smd: 1(0,-0.112) 2(0,5.588) 3(2.54,-0.112) 4(2.54,5.588) 5(5.08,-0.112) 6(5.08,5.588) 7(7.62,-0.112) 8(7.62,5.588) 9(10.16,-0.112) 10(10.16,5.588) 11(12.7,-0.112) 12(12.7,5.588) 13(15.24,-0.112) 14(15.24,5.588) 15(17.78,-0.112) 16(17.78,5.588) 17(20.32,-0.112) 18(20.32,5.588) 19(22.86,-0.112) 20(22.86,5.588) 21(25.4,-0.112) 22(25.4,5.588) 23(27.94,-0.112) 24(27.94,5.588) 25(30.48,-0.112) 26(30.48,5.588) 27(33.02,-0.112) 28(33.02,5.588) 29(35.56,-0.112) 30(35.56,5.588) 31(38.1,-0.112) 32(38.1,5.588) 33(40.64,-0.112) 34(40.64,5.588) 35(43.18,-0.112) 36(43.18,5.588) 37(45.72,-0.112) 38(45.72,5.588) 39(48.26,-0.112) 40(48.26,5.588) 41(50.8,-0.112) 42(50.8,5.588) 43(53.34,-0.112) 44(53.34,5.588) 45(55.88,-0.112) 46(55.88,5.588) 47(58.42,-0.112) 48(58.42,5.588)
Top Overlay:
  drawing of 196 lines, arcs and shapes, not listed
3D body "Fe-Header2X1.STEP": height 5.15, standoff 0, extent 11.43,-0.508 14.03,5.892
3D body "Fe-Header2X1.STEP": height 5.15, standoff 0, extent 6.35,-0.508 8.95,5.892
3D body "Fe-Header2X1.STEP": height 5.15, standoff 0, extent 8.89,-0.508 11.49,5.892
3D body "Fe-Header2X1.STEP": height 5.15, standoff 0, extent -1.27,-0.508 1.33,5.892
3D body "Fe-Header2X1.STEP": height 5.15, standoff 0, extent 1.27,-0.508 3.87,5.892
3D body "Fe-Header2X1.STEP": height 5.15, standoff 0, extent 3.81,-0.508 6.41,5.892
3D body "Fe-Header2X1.STEP": height 5.15, standoff 0, extent 26.67,-0.508 29.27,5.892
3D body "Fe-Header2X1.STEP": height 5.15, standoff 0, extent 21.59,-0.508 24.19,5.892
3D body "Fe-Header2X1.STEP": height 5.15, standoff 0, extent 24.13,-0.508 26.73,5.892
3D body "Fe-Header2X1.STEP": height 5.15, standoff 0, extent 13.97,-0.508 16.57,5.892
3D body "Fe-Header2X1.STEP": height 5.15, standoff 0, extent 16.51,-0.508 19.11,5.892
3D body "Fe-Header2X1.STEP": height 5.15, standoff 0, extent 19.05,-0.508 21.65,5.892
3D body "Fe-Header2X1.STEP": height 5.15, standoff 0, extent 41.91,-0.508 44.51,5.892
3D body "Fe-Header2X1.STEP": height 5.15, standoff 0, extent 36.83,-0.508 39.43,5.892
3D body "Fe-Header2X1.STEP": height 5.15, standoff 0, extent 39.37,-0.508 41.97,5.892
3D body "Fe-Header2X1.STEP": height 5.15, standoff 0, extent 29.21,-0.508 31.81,5.892
3D body "Fe-Header2X1.STEP": height 5.15, standoff 0, extent 31.75,-0.508 34.35,5.892
3D body "Fe-Header2X1.STEP": height 5.15, standoff 0, extent 34.29,-0.508 36.89,5.892
3D body "Fe-Header2X1.STEP": height 5.15, standoff 0, extent 57.15,-0.508 59.75,5.892
3D body "Fe-Header2X1.STEP": height 5.15, standoff 0, extent 52.07,-0.508 54.67,5.892
3D body "Fe-Header2X1.STEP": height 5.15, standoff 0, extent 54.61,-0.508 57.21,5.892
3D body "Fe-Header2X1.STEP": height 5.15, standoff 0, extent 44.45,-0.508 47.05,5.892
3D body "Fe-Header2X1.STEP": height 5.15, standoff 0, extent 46.99,-0.508 49.59,5.892
3D body "Fe-Header2X1.STEP": height 5.15, standoff 0, extent 49.53,-0.508 52.13,5.892

## Fe-HDR2X26/2.54-SMD [mm]
pads (52):
  rect 1.02x1.9 smd: 1(0,0) 2(0,5.7) 3(2.54,0) 4(2.54,5.7) 5(5.08,0) 6(5.08,5.7) 7(7.62,0) 8(7.62,5.7) 9(10.16,0) 10(10.16,5.7) 11(12.7,0) 12(12.7,5.7) 13(15.24,0) 14(15.24,5.7) 15(17.78,0) 16(17.78,5.7) 17(20.32,0) 18(20.32,5.7) 19(22.86,0) 20(22.86,5.7) 21(25.4,0) 22(25.4,5.7) 23(27.94,0) 24(27.94,5.7) 25(30.48,0) 26(30.48,5.7) 27(33.02,0) 28(33.02,5.7) 29(35.56,0) 30(35.56,5.7) 31(38.1,0) 32(38.1,5.7) 33(40.64,0) 34(40.64,5.7) 35(43.18,0) 36(43.18,5.7) 37(45.72,0) 38(45.72,5.7) 39(48.26,0) 40(48.26,5.7) 41(50.8,0) 42(50.8,5.7) 43(53.34,0) 44(53.34,5.7) 45(55.88,0) 46(55.88,5.7) 47(58.42,0) 48(58.42,5.7) 49(60.96,0) 50(60.96,5.7) 51(63.5,0) 52(63.5,5.7)
Top Overlay:
  drawing of 212 lines, arcs and shapes, not listed
3D body "Fe-Header2X1.STEP": height 5.15, standoff 0, extent 49.53,-0.508 52.13,5.892
3D body "Fe-Header2X1.STEP": height 5.15, standoff 0, extent 46.99,-0.508 49.59,5.892
3D body "Fe-Header2X1.STEP": height 5.15, standoff 0, extent 44.45,-0.508 47.05,5.892
3D body "Fe-Header2X1.STEP": height 5.15, standoff 0, extent 54.61,-0.508 57.21,5.892
3D body "Fe-Header2X1.STEP": height 5.15, standoff 0, extent 52.07,-0.508 54.67,5.892
3D body "Fe-Header2X1.STEP": height 5.15, standoff 0, extent 57.15,-0.508 59.75,5.892
3D body "Fe-Header2X1.STEP": height 5.15, standoff 0, extent 34.29,-0.508 36.89,5.892
3D body "Fe-Header2X1.STEP": height 5.15, standoff 0, extent 31.75,-0.508 34.35,5.892
3D body "Fe-Header2X1.STEP": height 5.15, standoff 0, extent 29.21,-0.508 31.81,5.892
3D body "Fe-Header2X1.STEP": height 5.15, standoff 0, extent 39.37,-0.508 41.97,5.892
3D body "Fe-Header2X1.STEP": height 5.15, standoff 0, extent 36.83,-0.508 39.43,5.892
3D body "Fe-Header2X1.STEP": height 5.15, standoff 0, extent 41.91,-0.508 44.51,5.892
3D body "Fe-Header2X1.STEP": height 5.15, standoff 0, extent 19.05,-0.508 21.65,5.892
3D body "Fe-Header2X1.STEP": height 5.15, standoff 0, extent 16.51,-0.508 19.11,5.892
3D body "Fe-Header2X1.STEP": height 5.15, standoff 0, extent 13.97,-0.508 16.57,5.892
3D body "Fe-Header2X1.STEP": height 5.15, standoff 0, extent 24.13,-0.508 26.73,5.892
3D body "Fe-Header2X1.STEP": height 5.15, standoff 0, extent 21.59,-0.508 24.19,5.892
3D body "Fe-Header2X1.STEP": height 5.15, standoff 0, extent 26.67,-0.508 29.27,5.892
3D body "Fe-Header2X1.STEP": height 5.15, standoff 0, extent 3.81,-0.508 6.41,5.892
3D body "Fe-Header2X1.STEP": height 5.15, standoff 0, extent 1.27,-0.508 3.87,5.892
3D body "Fe-Header2X1.STEP": height 5.15, standoff 0, extent -1.27,-0.508 1.33,5.892
3D body "Fe-Header2X1.STEP": height 5.15, standoff 0, extent 8.89,-0.508 11.49,5.892
3D body "Fe-Header2X1.STEP": height 5.15, standoff 0, extent 6.35,-0.508 8.95,5.892
3D body "Fe-Header2X1.STEP": height 5.15, standoff 0, extent 11.43,-0.508 14.03,5.892
3D body "Fe-Header2X1.STEP": height 5.15, standoff 0, extent 59.69,-0.508 62.29,5.892
3D body "Fe-Header2X1.STEP": height 5.15, standoff 0, extent 62.23,-0.508 64.83,5.892

## SMT2X20/2.54X3.5 NonHole [mm]
pads (40):
  rect 1x1.6 smd: 1(-24.13,-3.2) 2(-24.13,3.2) 3(-21.59,-3.2) 4(-21.59,3.2) 5(-19.05,-3.2) 6(-19.05,3.2) 7(-16.51,-3.2) 8(-16.51,3.2) 9(-13.97,-3.2) 10(-13.97,3.2) 11(-11.43,-3.2) 12(-11.43,3.2) 13(-8.89,-3.2) 14(-8.89,3.2) 15(-6.35,-3.2) 16(-6.35,3.2) 17(-3.81,-3.2) 18(-3.81,3.2) 19(-1.27,-3.2) 20(-1.27,3.2) 21(1.27,-3.2) 22(1.27,3.2) 23(3.81,-3.2) 24(3.81,3.2) 25(6.35,-3.2) 26(6.35,3.2) 27(8.89,-3.2) 28(8.89,3.2) 29(11.43,-3.2) 30(11.43,3.2) 31(13.97,-3.2) 32(13.97,3.2) 33(16.51,-3.2) 34(16.51,3.2) 35(19.05,-3.2) 36(19.05,3.2) 37(21.59,-3.2) 38(21.59,3.2) 39(24.13,-3.2) 40(24.13,3.2)
Top Overlay:
  lines w0.203: -25.72,-4.318 -25.72,4.317 25.781,4.317 25.781,-4.318 -25.72,-4.318
Keep-Out Layer:
  board cut-out: -22.86,-0.9 -22.949,-0.9 -23.123,-0.865 -23.286,-0.798 -23.434,-0.699 -23.559,-0.574 -23.658,-0.426 -23.725,-0.263 -23.76,-0.089 -23.76,0 -23.76,0.089 -23.725,0.263 -23.658,0.426 -23.559,0.574 -23.434,0.699 -23.286,0.798 -23.123,0.865 -22.949,0.9 -22.86,0.9 -22.771,0.9 -22.597,0.865 -22.434,0.798 -22.286,0.699 -22.161,0.574 -22.062,0.426 -21.995,0.263 -21.96,0.089 -21.96,0 -21.96,-0.089 -21.995,-0.263 -22.062,-0.426 -22.161,-0.574 -22.286,-0.699 -22.434,-0.798 -22.597,-0.865 -22.771,-0.9
  board cut-out: 21.96,0 21.96,-0.089 21.995,-0.263 22.062,-0.426 22.161,-0.574 22.286,-0.699 22.434,-0.798 22.597,-0.865 22.771,-0.9 22.86,-0.9 22.949,-0.9 23.123,-0.865 23.286,-0.798 23.434,-0.699 23.559,-0.574 23.658,-0.426 23.725,-0.263 23.76,-0.089 23.76,0 23.76,0.089 23.725,0.263 23.658,0.426 23.559,0.574 23.434,0.699 23.286,0.798 23.123,0.865 22.949,0.9 22.86,0.9 22.771,0.9 22.597,0.865 22.434,0.798 22.286,0.699 22.161,0.574 22.062,0.426 21.995,0.263 21.96,0.089
Mechanical 1:
  circle w0.1: c22.86,0 r0.9
  circle w0.1: c-22.86,0 r0.9
Mechanical 15:
  lines w0.102: -25.7,-4.3 25.8,-4.3 25.8,4.3 -25.7,4.3 -25.7,-4.3
  text "'.Designator'" at -5.6,-0.6 h2.03
3D body "2.54-3.55 矮贴片排母.STEP": height 3.77, standoff -0.15, extent -25.541,-3.729 25.659,3.471